# Altium footprint library KiCad.PcbLib: 1 footprints
Each footprint in its own frame and in the unit in brackets; x right, y up, seen from the top. Pads: shape width x height; smd on the part's side, far side on the other; paste and mask are expansions set on the pad; w line width, h text height; cw(c..) or ccw(c..) is an arc to the next point about the centre after c.
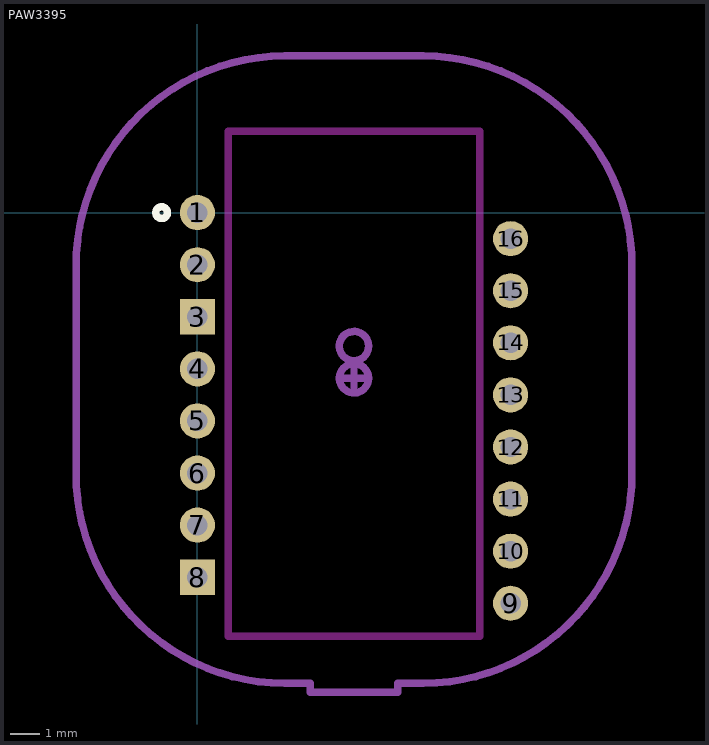
[diagram p0: the footprint, top view; thin cyan lines are the x and y axes]

## PAW3395 [mm]
pads (16):
  round 1.2 hole 0.7: 1(0,0) 2(0,-1.78) 4(0,-5.34) 5(0,-7.12) 6(0,-8.9) 7(0,-10.68) 9(10.7,-13.35) 10(10.7,-11.57) 11(10.7,-9.79) 12(10.7,-8.01) 13(10.7,-6.23) 14(10.7,-4.45) 15(10.7,-2.67) 16(10.7,-0.89)
  rect 1.2x1.2 hole 0.7: 3(0,-3.56) 8(0,-12.46)
F.SilkS:
  circle w0.254: c-1.225,0 r0.2
Edge.Cuts:
  lines w0.254: 1.05,-14.48 1.05,2.78 9.65,2.78 9.65,-14.48 1.05,-14.48
Dwgs.User:
  circle w0.254: c5.35,-4.56 r0.5
  lines w0.254: 5,-5.66 5.65,-5.66 ; 5.35,-5.95 5.35,-5.35
B.CrtYd:
  lines w0.254: -4.15,-8.89 -4.15,-1.84 cw(c3.012,-1.802) 2.975,5.36 7.725,5.36 cw(c7.688,-1.802) 14.85,-1.84 14.85,-8.89 cw(c7.688,-8.928) 7.725,-16.09 6.85,-16.09 6.85,-16.39 3.85,-16.39 3.85,-16.09 2.975,-16.09 cw(c3.012,-8.928) -4.15,-8.89
Cmts.User:
  circle w0.254: c5.35,-5.66 r0.5